# Altium integrated library Tantalium Capacitor 10uF 1206.IntLib: 1 symbol
Pins are listed as number, name and electrical type; pins without a type are passive.

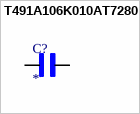
[diagram p0: symbol T491A106K010AT7280]

## T491A106K010AT7280
designator C?
10 ÂµF Molded Tantalum Capacitors 10 V 1206 (3216 Metric) 3.8Ohm; MF: KEMET; MP: T491A106K010AT7280; SnapEDA_Link: https://www.snapeda.com/parts/T491A106K010AT7280/KEMET/view-part/?ref=snap; Package: SMD-2 KEMET; Value: *; Check_prices: https://www.snapeda.com/parts/T491A106K010AT7280/KEMET/view-part/?ref=eda
footprint CAPC3216X110N
pins: 1, 2